# Altium schematic symbol library B39431B3710U410.SchLib: 1 symbol
Pins are listed as number, name and electrical type; pins without a type are passive.

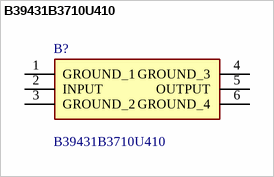
[diagram p0: symbol B39431B3710U410]

## B39431B3710U410
designator B?
Signal Conditioning 433.92MHz 50ohms B3710 2dB 6V; Manufacturer_Name: RF360; Geometry.Height: 1.225mm; Mouser Part Number: 871-B39431B3710U410; Mouser Price/Stock: https://www.mouser.co.uk/ProductDetail/RF360/B39431B3710U410?qs=hkeJtpWWodAvZBWtdUV7AQ%3D%3D; Manufacturer_Part_Number: B39431B3710U410; Datasheet Link: https://www.digikey.com/en/products/detail/qualcomm-rf-front-end-rffe-filters/B39431B3710U410/699773?msockid=3bdc366bbe0663d83c1223c0bf3662a6
footprint B39431B3710U410
pins: 1 GROUND_1, 2 INPUT, 3 GROUND_2, 4 GROUND_3, 5 OUTPUT, 6 GROUND_4